# Altium footprint library Control_PCB_Lib.PcbLib: 28 footprints (part 2 of 2)
Each footprint in its own frame and in the unit in brackets; x right, y up, seen from the top. Pads: shape width x height; smd on the part's side, far side on the other; paste and mask are expansions set on the pad; w line width, h text height; cw(c..) or ccw(c..) is an arc to the next point about the centre after c.
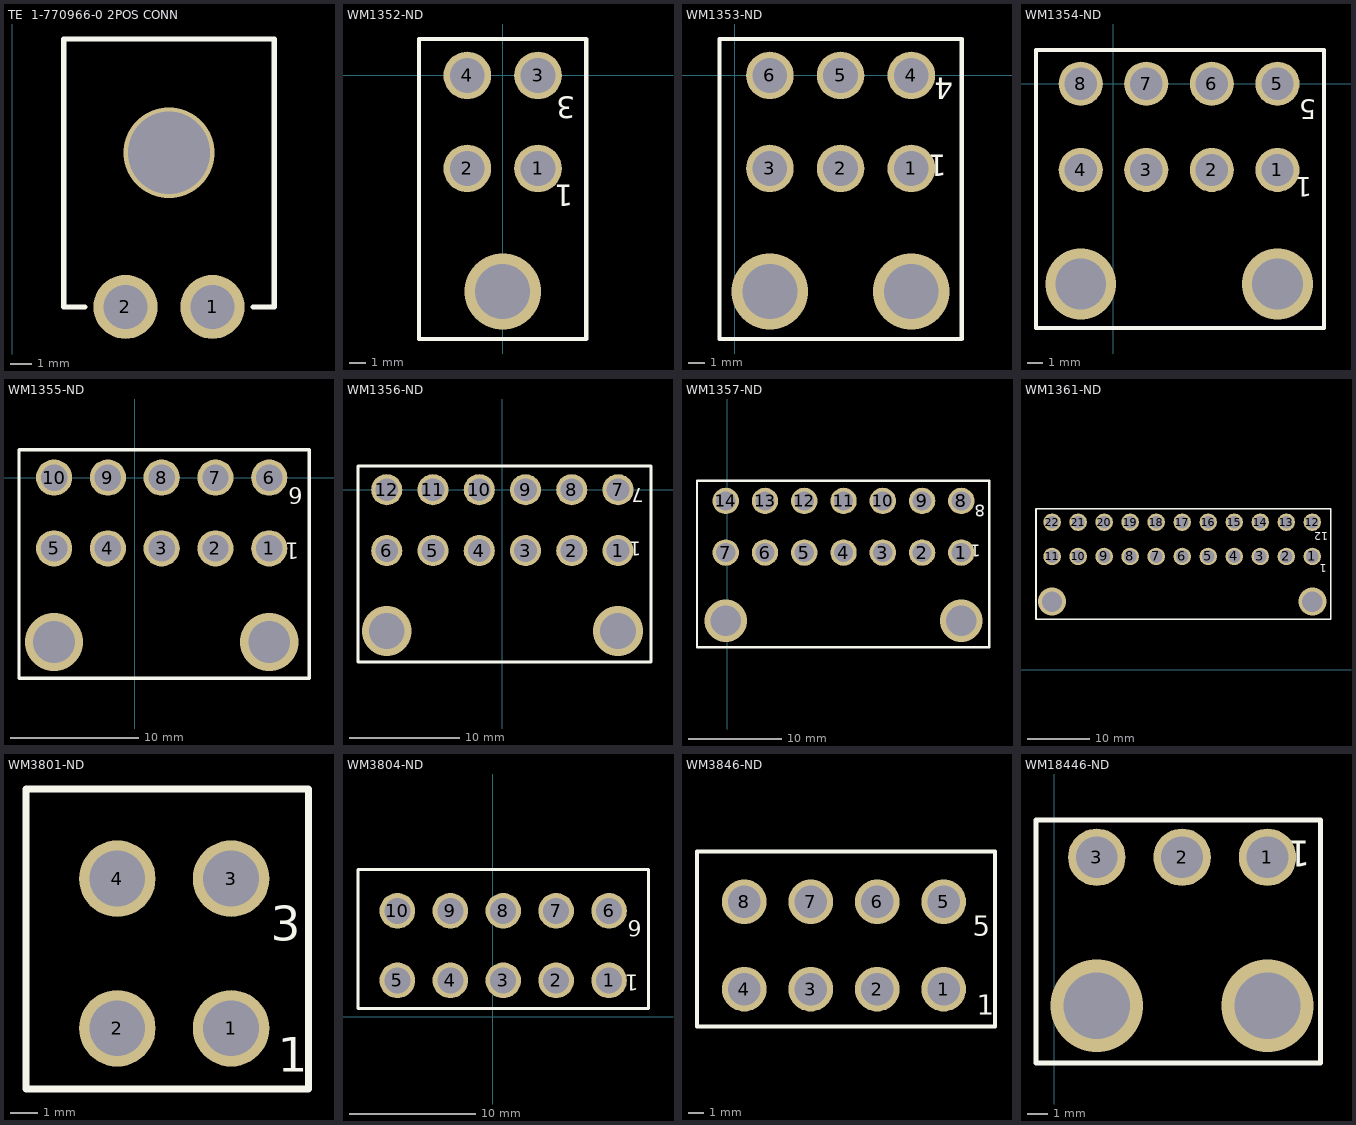
[diagram p1: the footprints below, top view; thin cyan lines are the x and y axes]

## TE  1-770966-0 2POS CONN [mil] "CONN HEADER R/A 2POS 4.14MM"
pads (2):
  round 120 hole 83: 1(375,-880) 2(212.01,-880)
via 293.5,-591.02 diameter 170 hole 154
Top Overlay:
  lines w10: 136.02,-880 96.65,-880 96.65,-378.03 490.35,-378.03 490.35,-880 450.98,-880
3D body "Mini_universal MATE-N-LOK - Horizontal - 2 Pin.stp": height 306.5, standoff -205.5, extent 101.99,-901.07 540.98,-322.08

## WM1352-ND [mil]
pads (4):
  round 111 hole 81: 1(82.5,-217) 2(-82.5,-217) 3(82.5,0) 4(-82.5,0)
via 0,-504 diameter 178 hole 128
Top Overlay:
  lines w10: -195,-615 -195,85 195,85 195,-615 -195,-615
  text "3" at 170,-50 h50
  text "1" at 165,-255 h50
3D body "039301040.stp": height 448.82, standoff -141.73, extent -184.25,-767.41 209.45,17.43

## WM1353-ND [mil]
pads (6):
  round 111 hole 81: 1(412.5,-217) 2(247.5,-217) 3(82.5,-217) 4(412.5,0) 5(247.5,0) 6(82.5,0)
via 412.5,-504 diameter 178 hole 128
via 82.5,-504 diameter 178 hole 128
Top Overlay:
  lines w10: -35,-615 -35,85 530,85 530,-615 -35,-615
  text "1" at 495,-185 h50
  text "4" at 510,-5 h50
3D body "039301060.stp": height 448.82, standoff -141.73, extent -14.06,-767.42 545,17.42

## WM1354-ND [mil]
pads (8):
  round 111 hole 81: 1(412.5,-217) 2(247.5,-217) 3(82.5,-217) 4(-82.5,-217) 5(412.5,0) 6(247.5,0) 7(82.5,0) 8(-82.5,0)
via -82.5,-504 diameter 178 hole 128
via 412.5,-504 diameter 178 hole 128
Top Overlay:
  lines w10: -195,-615 -195,85 530,85 530,-615 -195,-615
  text "5" at 510,-40 h50
  text "1" at 500,-235 h50
3D body "039301080.stp": height 448.82, standoff -141.73, extent -195,-762.42 529.41,22.42

## WM1355-ND [mil]
pads (10):
  round 111 hole 81: 1(412.5,-217) 2(247.5,-217) 3(82.5,-217) 4(-82.5,-217) 5(-247.5,-217) 6(412.5,0) 7(247.5,0) 8(82.5,0) 9(-82.5,0) 10(-247.5,0)
via -247.5,-504 diameter 178 hole 128
via 412.5,-504 diameter 178 hole 128
Top Overlay:
  lines w10: -355,-615 -355,85 535,85 535,-615 -355,-615
  text "6" at 515,-30 h50
  text "1" at 505,-200 h50
3D body "039301100.stp": height 448.82, standoff -141.73, extent -352,-764.99 537.76,19.85

## WM1356-ND [mil]
pads (12):
  round 111 hole 81: 1(412.5,-217) 2(247.5,-217) 3(82.5,-217) 4(-82.5,-217) 5(-247.5,-217) 6(-412.5,-217) 7(412.5,0) 8(247.5,0) 9(82.5,0) 10(-82.5,0) 11(-247.5,0) 12(-412.5,0)
via -412.5,-504 diameter 178 hole 128
via 412.5,-504 diameter 178 hole 128
Top Overlay:
  lines w10: -515,-615 -515,85 530,85 530,-615 -515,-615
  text "7" at 505,5 h50
  text "1" at 495,-185 h50
3D body "WM1356-ND.stp": height 448.82, standoff -141.73, extent -519.68,-765 535.44,19.84

## WM1357-ND [mil] "CONN HEADER R/A 14POS 4.2MM"
height 377.95
pads (14):
  round 111 hole 81: 1(983.35,966.16) 2(818.35,966.16) 3(653.35,966.16) 4(488.35,966.16) 5(323.35,966.16) 6(158.35,966.16) 7(-6.55,966.16) 8(983.35,1183.16) 9(818.35,1183.16) 10(653.35,1183.16) 11(488.35,1183.16) 12(323.35,1183.16) 13(158.35,1183.16) 14(-6.55,1183.16)
via 983.35,679.16 diameter 178 hole 128
via -6.54,679.17 diameter 178 hole 128
Top Overlay:
  lines w10: -127.41,568.16 1100.85,568.16 1100.85,1268.16 -127.41,1268.16 -127.41,568.16
  text "1" at 1065.85,998.16 h50
  text "8" at 1083.27,1167.84 h50
3D body "039301140.stp": height 448.82, standoff -141.73, extent -115.99,420.26 1104.48,1205.11

## WM1361-ND [mil] "CONN HEADER R/A 22POS 4.2MM"
height 377.95
pads (22):
  round 111 hole 81: 1(4063.21,718.36) 2(3898.21,718.36) 3(3733.21,718.36) 4(3568.21,718.36) 5(3403.21,718.36) 6(3238.21,718.36) 7(3073.21,718.35) 8(2908.21,718.35) 9(2743.21,718.35) 10(2578.21,718.35) 11(2413.21,718.35) 12(4063.21,935.36) 13(3898.21,935.36) 14(3733.21,935.36) 15(3568.21,935.36) 16(3403.21,935.36) 17(3238.21,935.36) 18(3073.21,935.35) 19(2908.21,935.35) 20(2743.21,935.35) 21(2578.21,935.35) 22(2413.21,935.35)
via 2413.21,431.35 diameter 178 hole 128
via 4063.21,431.36 diameter 178 hole 128
Top Overlay:
  lines w10: 2310.71,320.35 2310.71,1020.35 ; 2311.45,1020.36 4180.71,1020.36 4180.71,320.36 2312.97,320.36
  text "12" at 4163.64,872.15 h50
  text "1" at 4154.51,670.28 h50
3D body "039301220.stp": height 448.82, standoff -141.73, extent 2304.95,172.67 4186.84,957.51

## WM3801-ND [mil] "CONN HEADER VERT 4POS 4.2MM"
height 503.94
pads (4):
  round 111 hole 81: 1(562.5,358) 2(397.5,358) 3(562.5,575) 4(397.5,575)
Top Overlay:
  lines w10: 265,270 675,270 675,705 265,705 265,270
  text "1" at 630,295 h50
  text "3" at 620,485 h50
3D body "039281043.stp": height 503.94, standoff -137.8, extent 270,273.46 679.45,706.54

## WM3804-ND [mil] "CONN HEADER VERT 10POS 4.2MM"
height 503.94
pads (10):
  round 111 hole 81: 1(362.5,113) 2(197.5,113) 3(32.5,113) 4(-132.5,113) 5(-297.5,113) 6(362.5,330) 7(197.5,330) 8(32.5,330) 9(-132.5,330) 10(-297.5,330)
Top Overlay:
  lines w10: -420.25,25 -420.25,459.11 485,459.11 485,25 -420.25,25
  text "6" at 465,300 h50
  text "1" at 455,130 h50
3D body "039281103.stp": height 503.94, standoff -137.8, extent -420.25,26.03 485.26,459.11

## WM3846-ND [mil] "CONN HEADER VERT 8POS 4.2MM"
height 503.94
pads (8):
  round 111 hole 81: 1(2552.5,1048) 2(2387.5,1048) 3(2222.5,1048) 4(2057.5,1048) 5(2552.5,1265) 6(2387.5,1265) 7(2222.5,1265) 8(2057.5,1265)
Top Overlay:
  lines w10: 1940,955 2680,955 2680,1390 1940,1390 1940,955
  text "5" at 2625,1180 h50
  text "1" at 2635,985 h50
3D body "039293086.stp": height 503.94, standoff -137.8, extent 1939.93,956.03 2680.09,1389.1

## WM18446-ND [mil]
pads (3):
  round 111 hole 81: 1(412.5,-217) 2(247.5,-217) 3(82.5,-217)
via 82.5,-504 diameter 178 hole 128
via 412.5,-504 diameter 178 hole 128
Top Overlay:
  lines w10: -35,-615 515,-615 515,-145 -35,-145 -35,-615
  text "1" at 495,-185 h50
3D body "039303035.stp": height 283.46, standoff -137.8, extent -31.65,-748.15 511.65,-195